# Altium footprint library IC_BNO085.PcbLib: 1 footprints
Each footprint in its own frame and in the unit in brackets; x right, y up, seen from the top. Pads: shape width x height; smd on the part's side, far side on the other; paste and mask are expansions set on the pad; w line width, h text height; cw(c..) or ccw(c..) is an arc to the next point about the centre after c.
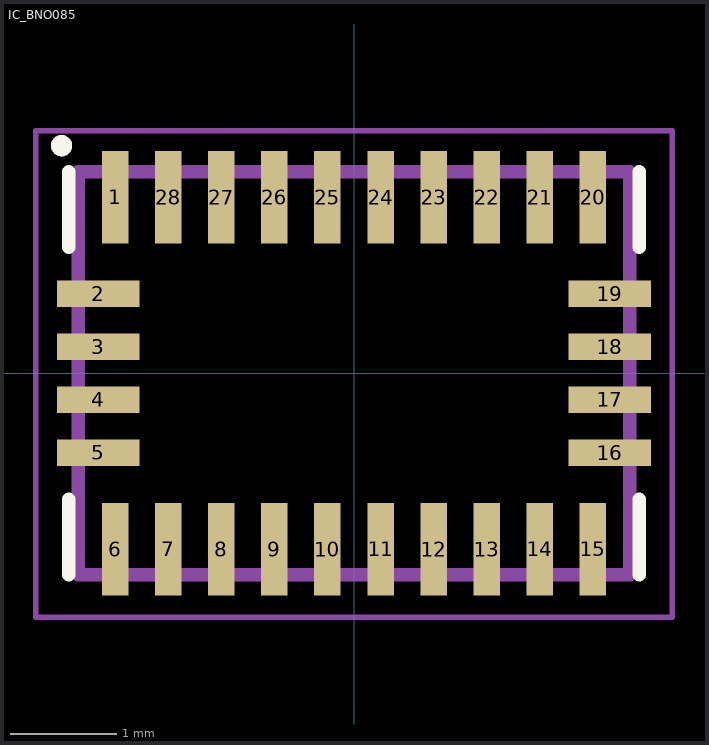
[diagram p0: the footprint, top view; thin cyan lines are the x and y axes]

## IC_BNO085 [mm]
height 1.18
pads (28):
  rect 0.25x0.875 smd: 1(-2.25,1.66) 6(-2.25,-1.66) 7(-1.75,-1.66) 8(-1.25,-1.66) 9(-0.75,-1.66) 10(-0.25,-1.66) 11(0.25,-1.66) 12(0.75,-1.66) 13(1.25,-1.66) 14(1.75,-1.66) 15(2.25,-1.66) 20(2.25,1.66) 21(1.75,1.66) 22(1.25,1.66) 23(0.75,1.66) 24(0.25,1.66) 25(-0.25,1.66) 26(-0.75,1.66) 27(-1.25,1.66) 28(-1.75,1.66)
  rect 0.775x0.25 smd: 2(-2.412,0.75) 3(-2.412,0.25) 4(-2.412,-0.25) 5(-2.412,-0.75) 16(2.412,-0.75) 17(2.412,-0.25) 18(2.412,0.25) 19(2.412,0.75)
Top Overlay:
  circle w0.1: c-2.758,2.146 r0.05
  lines w0.127: -2.689,-1.9 -2.689,-1.188 ; -2.689,1.188 -2.689,1.9 ; 2.689,-1.9 2.689,-1.188 ; 2.689,1.188 2.689,1.9
Mechanical 13:
  circle w0.1: c-2.758,2.146 r0.05
  lines w0.127: -2.6,-1.9 2.6,-1.9 2.6,1.9 -2.6,1.9 -2.6,-1.9
Mechanical 15:
  lines w0.05: -3,-2.3 3,-2.3 3,2.286 -3,2.286 -3,-2.3
3D body "step_temp.STEP": height 1.18, standoff 0, extent -2.6,-1.9 2.6,1.9